# Altium footprint library 3Cnts-S.PcbLib: 1 footprints
Each footprint in its own frame and in the unit in brackets; x right, y up, seen from the top. Pads: shape width x height; smd on the part's side, far side on the other; paste and mask are expansions set on the pad; w line width, h text height; cw(c..) or ccw(c..) is an arc to the next point about the centre after c.
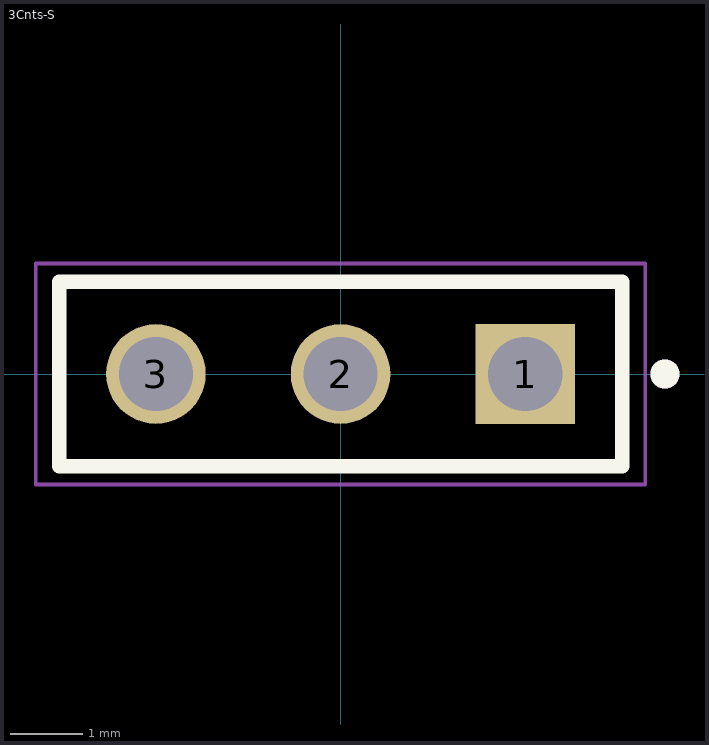
[diagram p0: the footprint, top view; thin cyan lines are the x and y axes]

## 3Cnts-S [mm] "3Cnts-S"
pads (3):
  rect 1.37x1.37 hole 1.02: 1(2.54,0)
  round 1.37 hole 1.02: 2(0,0) 3(-2.54,0)
Top Overlay:
  circle w0.2: c4.46,0 r0.1
  lines w0.2: 3.872,-1.27 3.872,1.27 ; 3.875,-1.27 -3.872,-1.27 -3.872,1.27 3.875,1.27
Mechanical 13:
  circle w0.2: c4.46,0 r0.1
  lines w0.1: -3.882,-1.27 3.867,-1.27 ; -3.882,1.273 3.864,1.267 -3.882,1.273 ; -3.882,1.273 -3.882,-1.267 -3.882,1.273 ; 3.867,-1.276 3.867,1.264 3.867,-1.276
Mechanical 15:
  lines w0.05: -4.191,-1.52 4.191,-1.52 4.191,1.52 -4.191,1.52 -4.191,-1.52
3D body "3Cnts-S.STEP": height 8.38, standoff -3.05, extent -3.81,-1.205 3.81,1.205